# Altium footprint library Grant_..PcbLib: 97 footprints (part 4 of 7)
Each footprint in its own frame and in the unit in brackets; x right, y up, seen from the top. Pads: shape width x height; smd on the part's side, far side on the other; paste and mask are expansions set on the pad; w line width, h text height; cw(c..) or ccw(c..) is an arc to the next point about the centre after c.
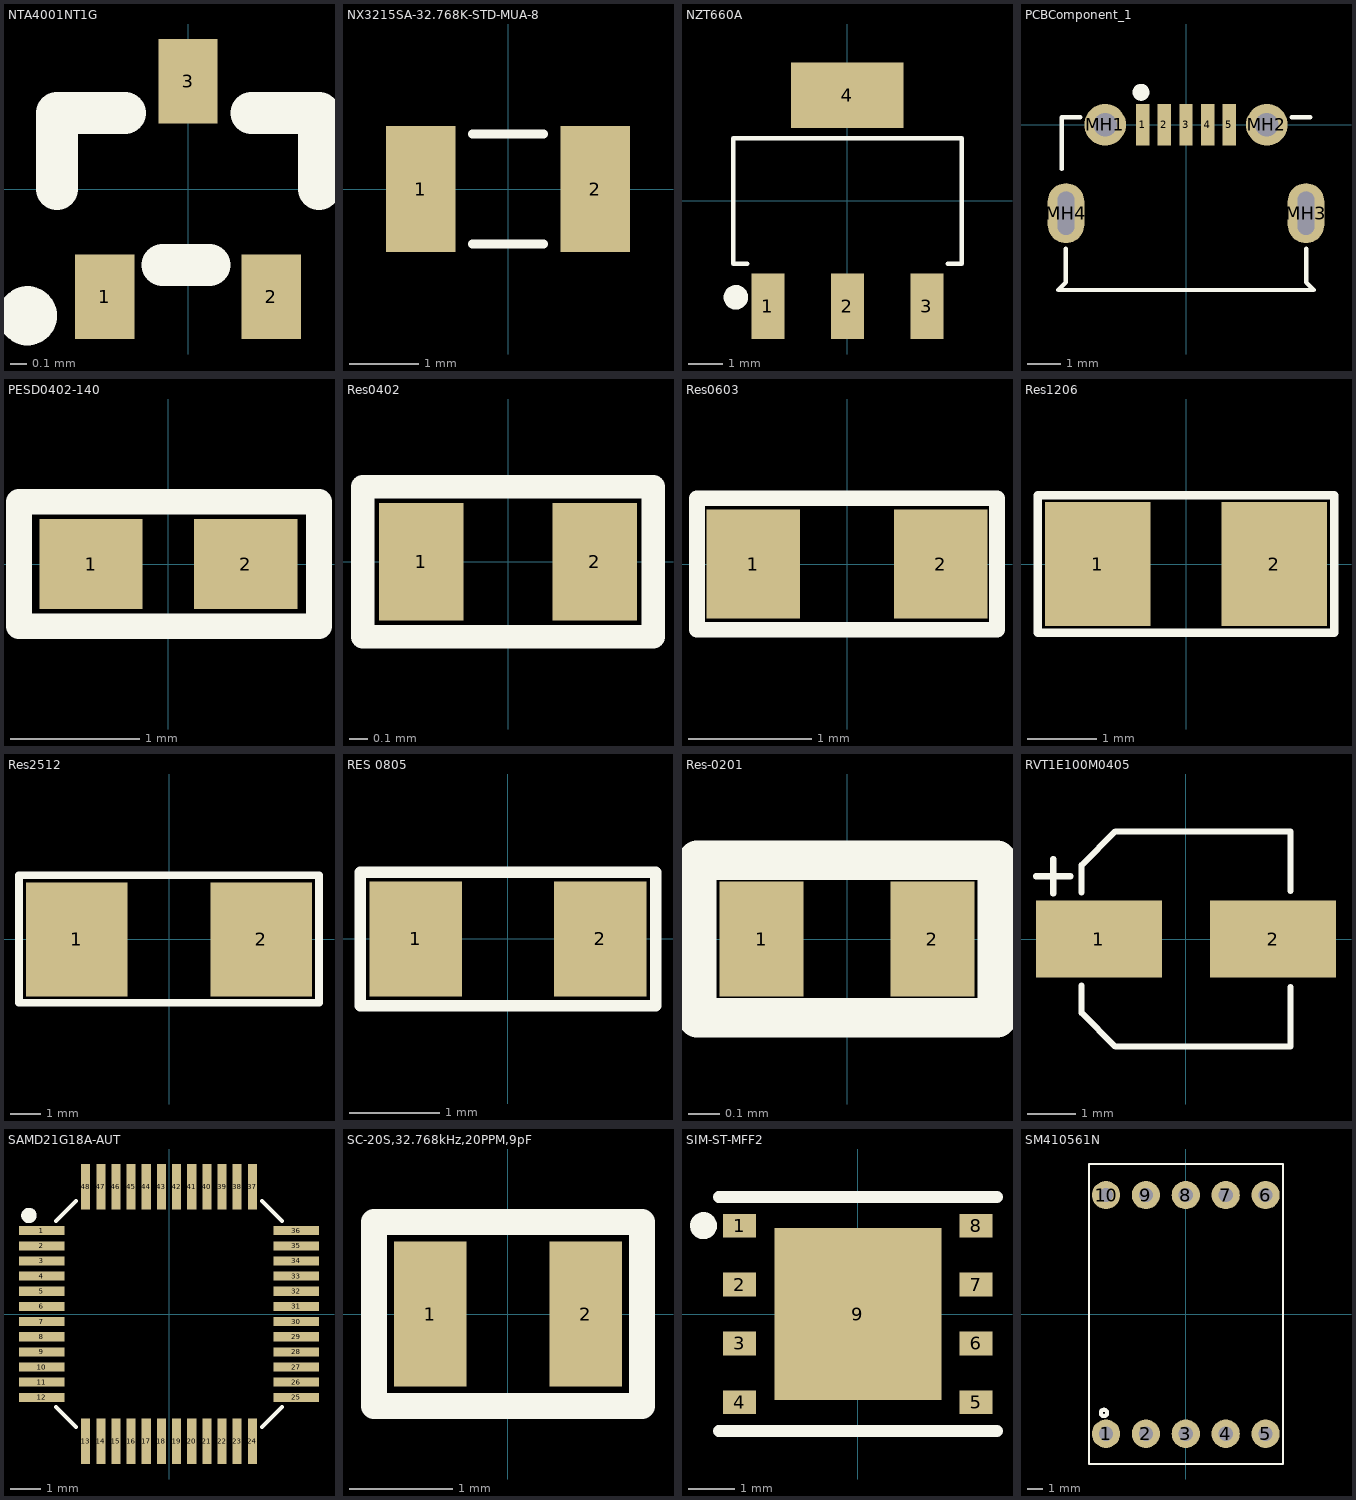
[diagram p3: the footprints below, top view; thin cyan lines are the x and y axes]

## NTA4001NT1G [mil]
pads (3):
  rect 14.02x20 smd: 1(-19.68,-25.49) 2(19.69,-25.49) 3(0,25.49)
Top Overlay:
  circle w10: c-38,-30 r2
  lines w10: -31,0 -31,18 -15,18 ; -6,-18 5,-18 ; 15,18 31,18 31,0
3D body "User Library-SOT-416.step": height 30.62, standoff -0.88, extent -31.49,-31.49 31.5,31.5

## NX3215SA-32.768K-STD-MUA-8 [mm]
pads (2):
  rect 1x1.8 smd: 1(-1.25,0) 2(1.25,0)
Top Overlay:
  lines w0.127: -0.508,-0.787 0.508,-0.787 ; -0.508,0.787 0.508,0.787
3D body "User Library-NDK_NX3215SA.STEP": height 0.8, standoff 0, extent -1.6,-0.75 1.6,0.75

## NZT660A [mm]
pads (4):
  rect 0.95x1.9 smd: 1(-2.3,-3.05) 2(0,-3.05) 3(2.3,-3.05)
  rect 3.25x1.9 smd: 4(0,3.05)
Top Overlay:
  circle w0.5: c-3.226,-2.794 r0.102
  lines w0.127: -2.896,-1.829 -3.302,-1.829 -3.302,1.803 3.302,1.803 3.302,-1.829 2.896,-1.829
3D body "User Library-SOT-223-1.step": height 1.61, standoff -0.04, extent -3.25,-3.5 3.25,3.5

## PCBComponent_1 [mm]
pads (9):
  rect 0.4x1.25 smd: 1(-1.3,0) 2(-0.65,0) 3(0,0) 4(0.65,0) 5(1.3,0)
  round 1.25 hole 0.7: MH1(-2.425,0) MH2(2.425,0)
  oval 1.1x1.8 hole 0.5 slot 1.3 at 90 deg: MH3(3.6,-2.65) MH4(-3.6,-2.65)
Top Overlay:
  circle w0.254: c-1.35,0.975 r0.127
  lines w0.127: -3.725,-1.325 -3.725,0.225 -3.175,0.225 ; -3.605,-3.715 -3.605,-4.715 -3.605,-4.725 -3.834,-4.954 3.825,-4.954 ; 3.175,0.225 3.725,0.225 ; 3.605,-4.725 3.834,-4.954 ; 3.605,-4.715 3.605,-3.715
3D body "10118194c.stp": height 2.72, standoff -0.55, extent -4.025,-5.405 4.025,0.175

## PESD0402-140 [mm]
pads (2):
  rect 0.8x0.7 smd: 1(-0.6,0) 2(0.6,0)
Top Overlay:
  lines w0.2: -1.159,-0.483 1.168,-0.483 1.168,0.483 -1.159,0.483 -1.159,-0.483
3D body "pesd0402-140.stp": height 0.39, standoff -0.03, extent -0.55,-0.3 0.55,0.3

## Res0402 [mil]
pads (2):
  rect 18x25 smd mask+4: 1(-18.5,0) 2(18.5,0)
Top Overlay:
  lines w0.13: -32,-17 32,-17
  lines w5: -31,-16 -31,16 31,16 31,-16 -31,-16
3D body "User Library-RES_1005-0402.step": height 16.14, standoff 0, extent -22.63,-10.82 22.64,10.83

## Res0603 [mil]
pads (2):
  rect 30x35 smd: 1(-30,0) 2(30,0)
Top Overlay:
  lines w5: -48,-21 48,-21 48,21 -48,21 -48,-21
3D body "User Library-RESC1608X05N.step": height 17.76, standoff 0, extent -30.52,-16.74 30.51,16.73

## Res1206 [mil]
pads (2):
  rect 60x70 smd: 1(-50,0) 2(50,0)
Top Overlay:
  lines w5: -84,-39 84,-39 84,39 -84,39 -84,-39
3D body "User Library-1206 SMD Resistor.step": height 39.45, standoff 0, extent -62.99,-31.49 63,31.51

## Res2512 [mm]
pads (2):
  rect 3.3x3.7 smd: 1(-3,0) 2(3,0)
Top Overlay:
  lines w0.254: -4.877,-2.057 4.877,-2.057 4.877,2.083 -4.877,2.083 -4.877,-2.057
3D body "User Library-2512 SMD Resistor.step": height 1.6, standoff 0, extent -3.099,-1.5 3.251,1.5

## RES 0805 [mil] "SMD 0805"
pads (2):
  rect 40x50 smd: 1(-40,0) 2(40,0)
Top Overlay:
  lines w5: -64,-29 -64,29 64,29 64,-29 -64,-29
3D body "User Library-CR2012-0805.STEP": height 23.62, standoff 0, extent -39.34,-24.75 39.4,24.46

## Res-0201 [mm]
pads (2):
  rect 0.27x0.37 smd: 1(-0.275,0) 2(0.275,0)
Top Overlay:
  lines w0.127: -0.483,-0.254 -0.483,0.254 0.483,0.254 0.483,-0.254 -0.483,-0.254
3D body "User Library-0201(0603M) Res.step": height 0.29, standoff -0.02, extent -0.305,-0.152 0.305,0.153

## RVT1E100M0405 [mm] "10uF 25V 5.4mm SMD"
pads (2):
  rect 2.6x1.6 smd: 1(-1.8,0) 2(1.8,0)
Top Overlay:
  lines w0.127: -3.099,1.295 -2.388,1.295 ; -2.743,0.94 -2.743,1.651 ; -2.159,-0.965 -2.159,-1.524 -1.46,-2.222 -1.27,-2.222 2.159,-2.222 2.159,-0.991 ; -2.159,0.965 -2.159,1.524 -1.46,2.222 -1.27,2.222 2.159,2.222 2.159,0.991
3D body "User Library-4x5_4.step": height 5.7, standoff 0, extent -2.65,-2.15 2.65,2.15

## SAMD21G18A-AUT [mm] "IC MCU 32BIT 256KB FLASH 48TQFP"
pads (48):
  rect 1.5x0.3 smd: 1(-4.2,2.75) 2(-4.2,2.25) 3(-4.2,1.75) 4(-4.2,1.25) 5(-4.2,0.75) 6(-4.2,0.25) 7(-4.2,-0.25) 8(-4.2,-0.75) 9(-4.2,-1.25) 10(-4.2,-1.75) 11(-4.2,-2.25) 12(-4.2,-2.75) 25(4.2,-2.75) 26(4.2,-2.25) 27(4.2,-1.75) 28(4.2,-1.25) 29(4.2,-0.75) 30(4.2,-0.25) 31(4.2,0.25) 32(4.2,0.75) 33(4.2,1.25) 34(4.2,1.75) 35(4.2,2.25) 36(4.2,2.75)
  rect 0.3x1.5 smd: 13(-2.75,-4.2) 14(-2.25,-4.2) 15(-1.75,-4.2) 16(-1.25,-4.2) 17(-0.75,-4.2) 18(-0.25,-4.2) 19(0.25,-4.2) 20(0.75,-4.2) 21(1.25,-4.2) 22(1.75,-4.2) 23(2.25,-4.2) 24(2.75,-4.2) 37(2.75,4.2) 38(2.25,4.2) 39(1.75,4.2) 40(1.25,4.2) 41(0.75,4.2) 42(0.25,4.2) 43(-0.25,4.2) 44(-0.75,4.2) 45(-1.25,4.2) 46(-1.75,4.2) 47(-2.25,4.2) 48(-2.75,4.2)
Top Overlay:
  circle w0.254: c-4.623,3.251 r0.127
  lines w0.127: -3.734,-3.073 -3.073,-3.734 ; -3.734,3.073 -3.073,3.734 ; 3.073,-3.734 3.734,-3.073 ; 3.073,3.734 3.734,3.073
3D body "User Library-TQFP-48.STEP": height 1.42, standoff -0.04, extent -4.5,-4.504 4.5,4.496

## SC-20S,32.768kHz,20PPM,9pF [mm]
pads (2):
  rect 0.7x1.4 smd: 1(-0.75,0) 2(0.75,0)
Top Overlay:
  lines w0.254: -1.295,-0.889 -1.295,0.889 1.295,0.889 1.295,-0.889 -1.295,-0.889
3D body "module.stp": height 0.57, standoff -0.03, extent -1.025,-0.6 1.025,0.6

## SIM-ST-MFF2 [mm]
pads (9):
  rect 0.71x0.51 smd: 1(-2.55,1.905) 2(-2.55,0.635) 3(-2.55,-0.635) 4(-2.55,-1.905) 5(2.55,-1.905) 6(2.55,-0.635) 7(2.55,0.635) 8(2.55,1.905)
  rect 3.6x3.7 smd: 9(0,0)
Top Overlay:
  circle w0.3: c-3.327,1.905 r0.141
  lines w0.254: -3,-2.525 3,-2.525 ; -3,2.525 3,2.525
Top Paste:
  region: 0.18,-0.18 1.5,-0.18 1.5,-1.45 0.18,-1.45
  region: -1.5,-0.18 -0.18,-0.18 -0.18,-1.45 -1.5,-1.45
  region: 0.18,1.45 1.5,1.45 1.5,0.18 0.18,0.18
  region: -1.5,1.45 -0.18,1.45 -0.18,0.18 -1.5,0.18
3D body "SIM-ST-MFF2--3DModel-STEP-56544.STEP": height 0.82, standoff 0, extent -3,-2.5 3,2.5

## SM410561N [mm]
pads (10):
  round 1.8 hole 0.9: 1(-5.08,-7.6) 2(-2.54,-7.6) 3(0,-7.6) 4(2.54,-7.6) 5(5.08,-7.6) 6(5.08,7.6) 7(2.54,7.6) 8(0,7.6) 9(-2.54,7.6) 10(-5.08,7.6)
Top Overlay:
  circle w0.254: c-5.207,-6.274 r0.205
  lines w0.127: -6.172,-9.525 -6.172,9.576 6.198,9.576 6.198,-9.525 -6.172,-9.525
3D body "User Library-7 Segment LED Module.step": height 8.2, standoff -3.3, extent -6.15,-9.475 6.15,9.525